# Altium footprint library basicfootprints.PcbLib: 522 footprints (part 19 of 33)
Each footprint in its own frame and in the unit in brackets; x right, y up, seen from the top. Pads: shape width x height; smd on the part's side, far side on the other; paste and mask are expansions set on the pad; w line width, h text height; cw(c..) or ccw(c..) is an arc to the next point about the centre after c.
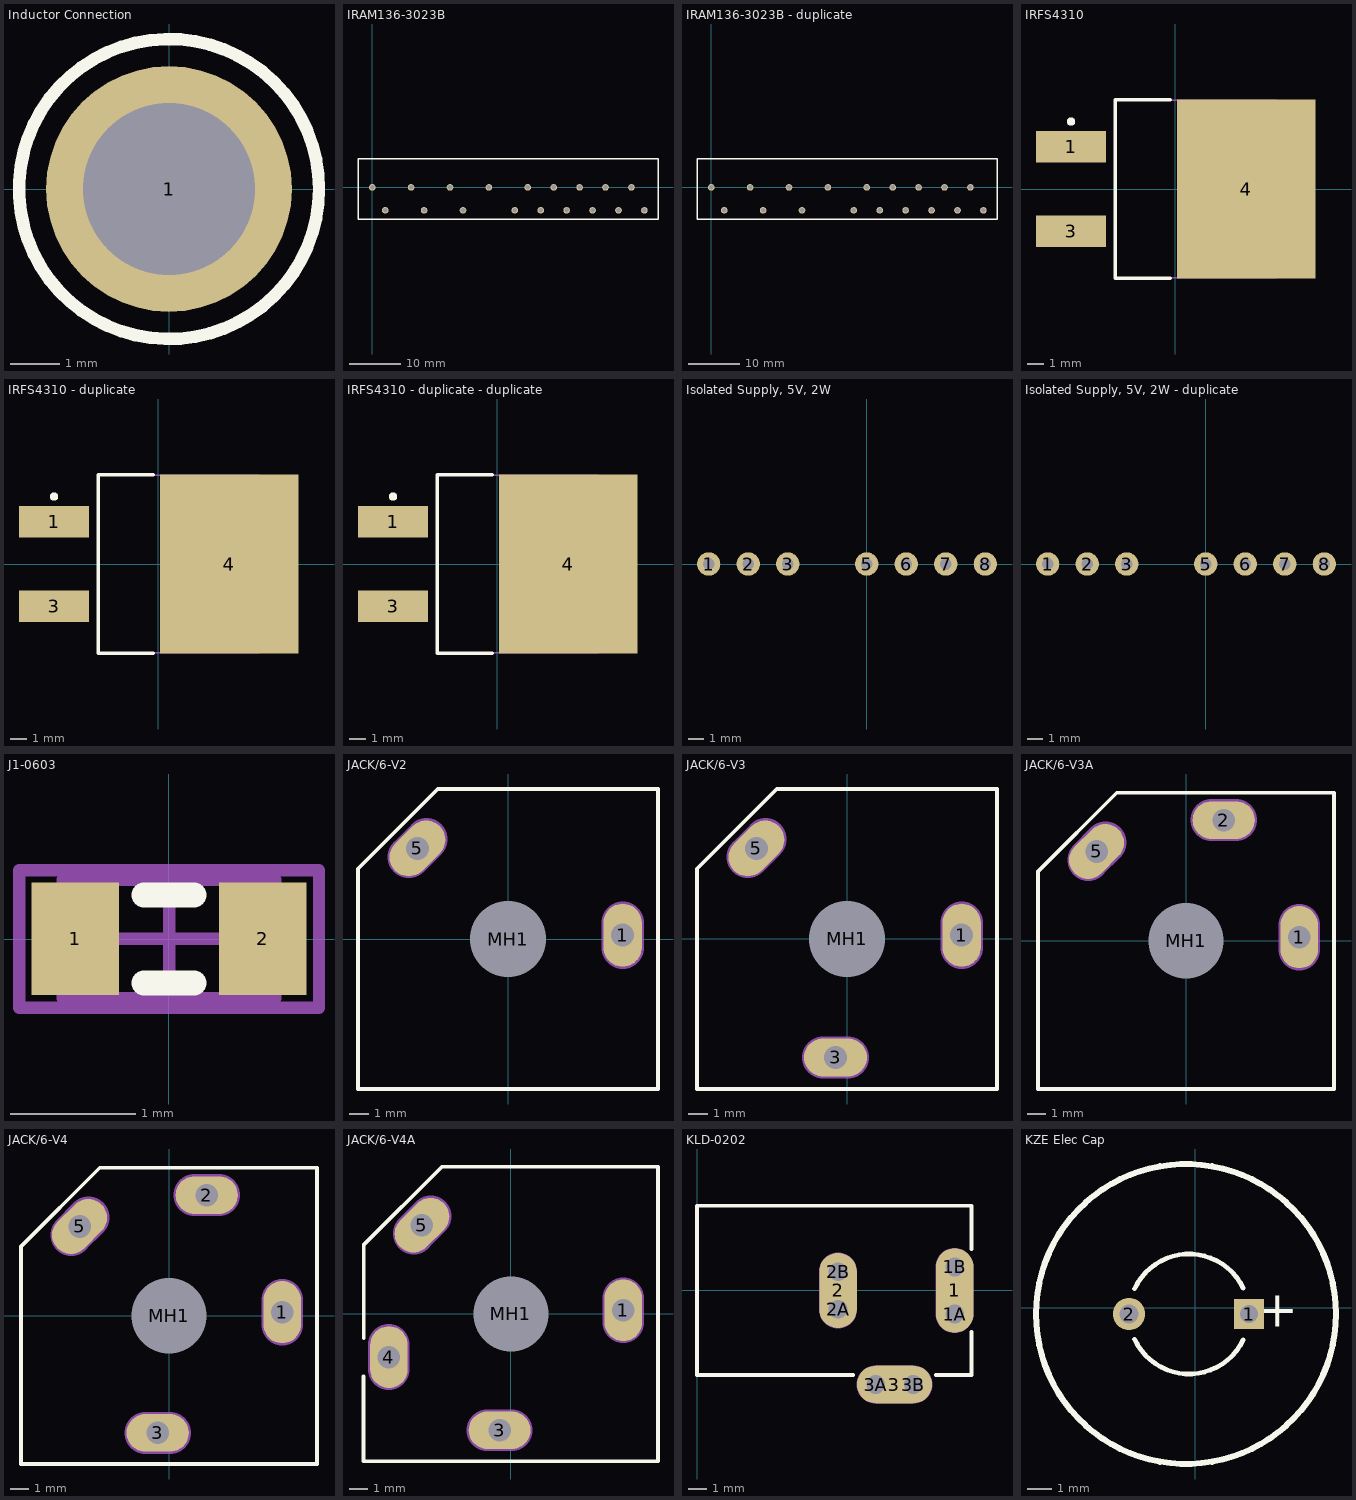
[diagram p18: the footprints below, top view; thin cyan lines are the x and y axes]

## Inductor Connection [mm] "Via for up to 10 AWG wire"
pads (1):
  round 5 hole 3.5: 1(0,0)
Top Overlay:
  circle w0.254: c0,0 r3.051

## IRAM136-3023B [mm] "Phoenix 3-terminal Block Screw connector"
pads (18):
  round 1.3 hole 0.9: 1(0,0) 2(2.54,-4.5) 4(7.62,0) 5(10.16,-4.5) 7(15.24,0) 8(17.78,-4.5) 10(22.86,0) 12(27.94,-4.5) 13(30.48,0) 14(33.02,-4.5) 15(35.56,0) 16(38.1,-4.5) 17(40.64,0) 18(43.18,-4.5) 19(45.72,0) 20(48.26,-4.5) 21(50.8,0) 22(53.34,-4.5)
Top Overlay:
  lines w0.254: -2.794,-6.223 56.007,-6.223 56.007,5.588 -2.794,5.588 -2.794,-6.223

## IRAM136-3023B - duplicate [mm] "Phoenix 3-terminal Block Screw connector"
pads (18):
  round 1.3 hole 0.9: 1(0,0) 2(2.54,-4.5) 4(7.62,0) 5(10.16,-4.5) 7(15.24,0) 8(17.78,-4.5) 10(22.86,0) 12(27.94,-4.5) 13(30.48,0) 14(33.02,-4.5) 15(35.56,0) 16(38.1,-4.5) 17(40.64,0) 18(43.18,-4.5) 19(45.72,0) 20(48.26,-4.5) 21(50.8,0) 22(53.34,-4.5)
Top Overlay:
  lines w0.254: -2.794,-6.223 56.007,-6.223 56.007,5.588 -2.794,5.588 -2.794,-6.223

## IRFS4310 [mm] "D2-PAK, 3-Pads, Body 9.6x10.7mm (max), IPC Medium Density"
height 4.83
pads (3):
  rect 4.2x1.9 smd: 1(-6.25,2.54) 3(-6.25,-2.54)
  rect 8.3x10.75 smd: 4(4.25,0)
Top Overlay:
  circle w0.25: c-6.25,4.04 r0.125
  lines w0.2: -0.3,-5.35 -3.6,-5.35 -3.6,5.35 -0.3,5.35
Mechanical 13:
  lines w0.1: -3.6,-5.325 -3.6,5.325 6.05,5.325 6.05,-5.325 -3.6,-5.325
3D body: height 4.83, standoff 0.38, extent -3.6,-5.325 6.05,5.325

## IRFS4310 - duplicate [mm] "D2-PAK, 3-Pads, Body 9.6x10.7mm (max), IPC Medium Density"
height 4.83
pads (3):
  rect 4.2x1.9 smd: 1(-6.25,2.54) 3(-6.25,-2.54)
  rect 8.3x10.75 smd: 4(4.25,0)
Top Overlay:
  circle w0.25: c-6.25,4.04 r0.125
  lines w0.2: -0.3,-5.35 -3.6,-5.35 -3.6,5.35 -0.3,5.35
Mechanical 13:
  lines w0.1: -3.6,-5.325 -3.6,5.325 6.05,5.325 6.05,-5.325 -3.6,-5.325
3D body: height 4.83, standoff 0.38, extent -3.6,-5.325 6.05,5.325

## IRFS4310 - duplicate - duplicate [mm] "D2-PAK, 3-Pads, Body 9.6x10.7mm (max), IPC Medium Density"
height 4.83
pads (3):
  rect 4.2x1.9 smd: 1(-6.25,2.54) 3(-6.25,-2.54)
  rect 8.3x10.75 smd: 4(4.25,0)
Top Overlay:
  circle w0.25: c-6.25,4.04 r0.125
  lines w0.2: -0.3,-5.35 -3.6,-5.35 -3.6,5.35 -0.3,5.35
Mechanical 13:
  lines w0.1: -3.6,-5.325 6.05,-5.325 6.05,5.325 -3.6,5.325 -3.6,-5.325
3D body: height 4.83, standoff 0.38, extent -3.6,-5.325 6.05,5.325

## Isolated Supply, 5V, 2W [mm] "PG02S2405A"
pads (7):
  round 1.5 hole 0.75: 1(-10.16,0) 2(-7.62,0) 3(-5.08,0) 5(0,0) 6(2.54,0) 7(5.08,0) 8(7.62,0)
3D body: height 11.2, standoff 0.5, extent -12.192,-6.604 9.652,2.667

## Isolated Supply, 5V, 2W - duplicate [mm] "PG02S2405A"
pads (7):
  round 1.5 hole 0.75: 1(-10.16,0) 2(-7.62,0) 3(-5.08,0) 5(0,0) 6(2.54,0) 7(5.08,0) 8(7.62,0)
3D body: height 11.2, standoff 0.5, extent -12.192,-6.604 9.652,2.667

## J1-0603 [mm] "Chip Resistor, Body 1.6x0.8mm, IPC High Density"
height 0.9
pads (2):
  rect 0.7x0.9 smd: 1(-0.75,0) 2(0.75,0)
Top Overlay:
  lines w0.2: -0.2,-0.35 0.2,-0.35 ; -0.2,0.35 0.2,0.35
Mechanical 13:
  lines w0.1: -0.85,-0.475 0.85,-0.475 0.85,0.475 -0.85,0.475 -0.85,-0.475
Mechanical 15:
  lines w0.1: -0.475,0 0.475,0 ; 0,-0.475 0,0.475 ; -1.2,-0.55 1.2,-0.55 1.2,0.55 -1.2,0.55 -1.2,-0.55
3D body: height 0.9, standoff 0, extent -0.85,-0.475 0.85,0.475

## JACK/6-V2 [mm] "Connector; Jack Socket, 1/4\" [6.5mm], Thru-Hole, 2 Position, Vertical, Body 15.7 x 15.7 x 31 mm (WxTxH)"
height 31.1
pads (3):
  oval 2x3.3 hole 1.2: 1(6,0.2)
  oval 2x3.3 hole 1.2 rot 135: 5(-4.738,4.738)
  round 3.7 hole 4: MH1(0,0)
Top Overlay:
  lines w0.2: -7.85,-7.85 7.85,-7.85 7.85,7.85 -3.675,7.85 -7.85,3.675 -7.85,-7.85
Mechanical 1:
  lines w1.2: -5.185,4.295 -4.266,5.214 ; 6,-0.45 6,0.85
  text "Alert PCB fab to slot details" at -7.9,9.66 h0.3
  text "Slot 1.2x2.5mm, PTH" at -7.9,9.16 h0.3
  text "Assign keep-out area to slot" at -7.9,10.16 h0.3
  text "Mech 1 - Slot cut-out" at -7.9,8.66 h0.3
  text "Mech 2 - Clearance, move to internal plane if present" at -7.9,8.16 h0.3
Mechanical 2:
  lines w2.216: -5.185,4.295 -4.266,5.214 ; 6,-0.45 6,0.85

## JACK/6-V3 [mm] "Connector; Jack Socket, 1/4\" [6.5mm], Thru-Hole, 3 Position, Vertical, Body 15.7 x 15.7 x 31 mm (WxTxH)"
height 31.1
pads (4):
  oval 2x3.3 hole 1.2: 1(6,0.2)
  oval 3.3x2 hole 1.2: 3(-0.6,-6.2)
  oval 2x3.3 hole 1.2 rot 135: 5(-4.738,4.738)
  round 3.7 hole 4: MH1(0,0)
Top Overlay:
  lines w0.2: -7.85,-7.85 -7.85,3.675 -3.675,7.85 7.85,7.85 7.85,-7.85 -7.85,-7.85
Mechanical 1:
  lines w1.2: -5.185,4.295 -4.266,5.214 ; -1.25,-6.2 0.05,-6.2 ; 6,-0.45 6,0.85
  text "Mech 2 - Clearance, move to internal plane if present" at -7.9,8.16 h0.3
  text "Mech 1 - Slot cut-out" at -7.9,8.66 h0.3
  text "Assign keep-out area to slot" at -7.9,10.16 h0.3
  text "Slot 1.2x2.5mm, PTH" at -7.9,9.16 h0.3
  text "Alert PCB fab to slot details" at -7.9,9.66 h0.3
Mechanical 2:
  lines w2.216: -5.185,4.295 -4.266,5.214 ; -1.25,-6.2 0.05,-6.2 ; 6,-0.45 6,0.85

## JACK/6-V3A [mm] "Connector; Jack Socket, 1/4\" [6.5mm], Thru-Hole, 3 Position, Vertical, Body 15.7 x 15.7 x 31 mm (WxTxH)"
height 31.1
pads (4):
  oval 2x3.3 hole 1.2: 1(6,0.2)
  oval 3.3x2 hole 1.2: 2(2,6.4)
  oval 2x3.3 hole 1.2 rot 135: 5(-4.738,4.738)
  round 3.7 hole 4: MH1(0,0)
Top Overlay:
  lines w0.2: -7.85,-7.85 7.85,-7.85 7.85,7.85 -3.675,7.85 -7.85,3.675 -7.85,-7.85
Mechanical 1:
  lines w1.2: -5.185,4.295 -4.266,5.214 ; 1.35,6.4 2.65,6.4 ; 6,-0.45 6,0.85
  text "Mech 2 - Clearance, move to internal plane if present" at -7.9,8.16 h0.3
  text "Mech 1 - Slot cut-out" at -7.9,8.66 h0.3
  text "Assign keep-out area to slot" at -7.9,10.16 h0.3
  text "Slot 1.2x2.5mm, PTH" at -7.9,9.16 h0.3
  text "Alert PCB fab to slot details" at -7.9,9.66 h0.3
Mechanical 2:
  lines w2.216: -5.185,4.295 -4.266,5.214 ; 1.35,6.4 2.65,6.4 ; 6,-0.45 6,0.85

## JACK/6-V4 [mm] "Connector; Jack Socket, 1/4\" [6.5mm], Thru-Hole, 4 Position, Vertical, Body 15.7 x 15.7 x 31 mm (WxTxH)"
height 31.1
pads (5):
  oval 2x3.3 hole 1.2: 1(6,0.2)
  oval 3.3x2 hole 1.2: 2(2,6.4) 3(-0.6,-6.2)
  oval 2x3.3 hole 1.2 rot 135: 5(-4.738,4.738)
  round 3.7 hole 4: MH1(0,0)
Top Overlay:
  lines w0.2: -7.85,-7.85 7.85,-7.85 7.85,7.85 -3.675,7.85 -7.85,3.675 -7.85,-7.85
Mechanical 1:
  lines w1.2: -5.185,4.295 -4.266,5.214 ; -1.25,-6.2 0.05,-6.2 ; 1.35,6.4 2.65,6.4 ; 6,-0.45 6,0.85
  text "Mech 2 - Clearance, move to internal plane if present" at -7.9,8.16 h0.3
  text "Mech 1 - Slot cut-out" at -7.9,8.66 h0.3
  text "Assign keep-out area to slot" at -7.9,10.16 h0.3
  text "Slot 1.2x2.5mm, PTH" at -7.9,9.16 h0.3
  text "Alert PCB fab to slot details" at -7.9,9.66 h0.3
Mechanical 2:
  lines w2.216: -5.185,4.295 -4.266,5.214 ; -1.25,-6.2 0.05,-6.2 ; 1.35,6.4 2.65,6.4 ; 6,-0.45 6,0.85

## JACK/6-V4A [mm] "Connector; Jack Socket, 1/4\" [6.5mm], Thru-Hole, 4 Position, Vertical, Body 15.7 x 15.7 x 31 mm (WxTxH)"
height 31.1
pads (5):
  oval 2x3.3 hole 1.2: 1(6,0.2) 4(-6.5,-2.3)
  oval 3.3x2 hole 1.2: 3(-0.6,-6.2)
  oval 2x3.3 hole 1.2 rot 135: 5(-4.738,4.738)
  round 3.7 hole 4: MH1(0,0)
Top Overlay:
  lines w0.2: -7.85,-3.32 -7.85,-7.85 7.85,-7.85 7.85,7.85 -3.675,7.85 -7.85,3.675 -7.85,-1.28
Mechanical 1:
  lines w1.2: -6.5,-2.95 -6.5,-1.65 ; -5.185,4.295 -4.266,5.214 ; -1.25,-6.2 0.05,-6.2 ; 6,-0.45 6,0.85
  text "Mech 2 - Clearance, move to internal plane if present" at -7.9,8.16 h0.3
  text "Mech 1 - Slot cut-out" at -7.9,8.66 h0.3
  text "Assign keep-out area to slot" at -7.9,10.16 h0.3
  text "Slot 1.2x2.5mm, PTH" at -7.9,9.16 h0.3
  text "Alert PCB fab to slot details" at -7.9,9.66 h0.3
Mechanical 2:
  lines w2.216: -6.5,-2.95 -6.5,-1.65 ; -5.185,4.295 -4.266,5.214 ; -1.25,-6.2 0.05,-6.2 ; 6,-0.45 6,0.85

## KLD-0202 [mm] "DC Power Jack, 2.5mm, KLD Series, PCB Mount"
pads (9):
  oval 2x4.5 all layers, no hole: 1(13.7,0)
  round 1.5 hole 1: 1A(13.7,-1.25) 1B(13.7,1.25) 2A(7.5,-1) 2B(7.5,1) 3A(9.5,-5) 3B(11.5,-5)
  oval 2x4 all layers, no hole: 2(7.5,0)
  oval 4x2 all layers, no hole: 3(10.5,-5)
Top Overlay:
  lines w0.2: 8.3,-4.5 0,-4.5 0,4.5 14.6,4.5 14.6,2.2 ; 12.7,-4.5 14.6,-4.5 14.6,-2.2
Mechanical 1:
  lines w1: 7.5,-1 7.5,1 ; 9.5,-5 11.5,-5 ; 13.7,-1.25 13.7,1.25
  text "Alert PCB fab to slot details" at 0.286,6.066 h0.3
  text "Assign keep-out area to slot" at 0.286,6.566 h0.3
  text "Mech 1 - Slot cut-out" at 0.286,5.566 h0.3
  text "Mech 2 - Clearance, move to internal plane if present" at 0.286,5.066 h0.3
Mechanical 2:
  lines w2.016: 7.5,-1 7.5,1 ; 9.5,-5 11.5,-5 ; 13.7,-1.25 13.7,1.25

## KZE Elec Cap [mm] "KZE Series 12.5Phi"
pads (2):
  rect 1.25x1.25 hole 0.75: 1(2.246,-0.254)
  round 1.35 hole 0.8: 2(-2.754,-0.254)
Top Overlay:
  circle w0.254: c-0.381,-0.254 r6.25
  lines w0.2: -2.523,-1.304 ccw(c-0.254,-0.254) 2.003,-1.329 ; -2.523,0.796 cw(c-0.254,-0.254) 2.003,0.821
  text "+" at 4.296,0.496 h1.5
3D body: height 31, standoff 1, extent -6.604,-6.604 5.847,5.871